# Altium footprint library RCW_PcbLib.PcbLib: 61 footprints (part 3 of 4)
Each footprint in its own frame and in the unit in brackets; x right, y up, seen from the top. Pads: shape width x height; smd on the part's side, far side on the other; paste and mask are expansions set on the pad; w line width, h text height; cw(c..) or ccw(c..) is an arc to the next point about the centre after c.
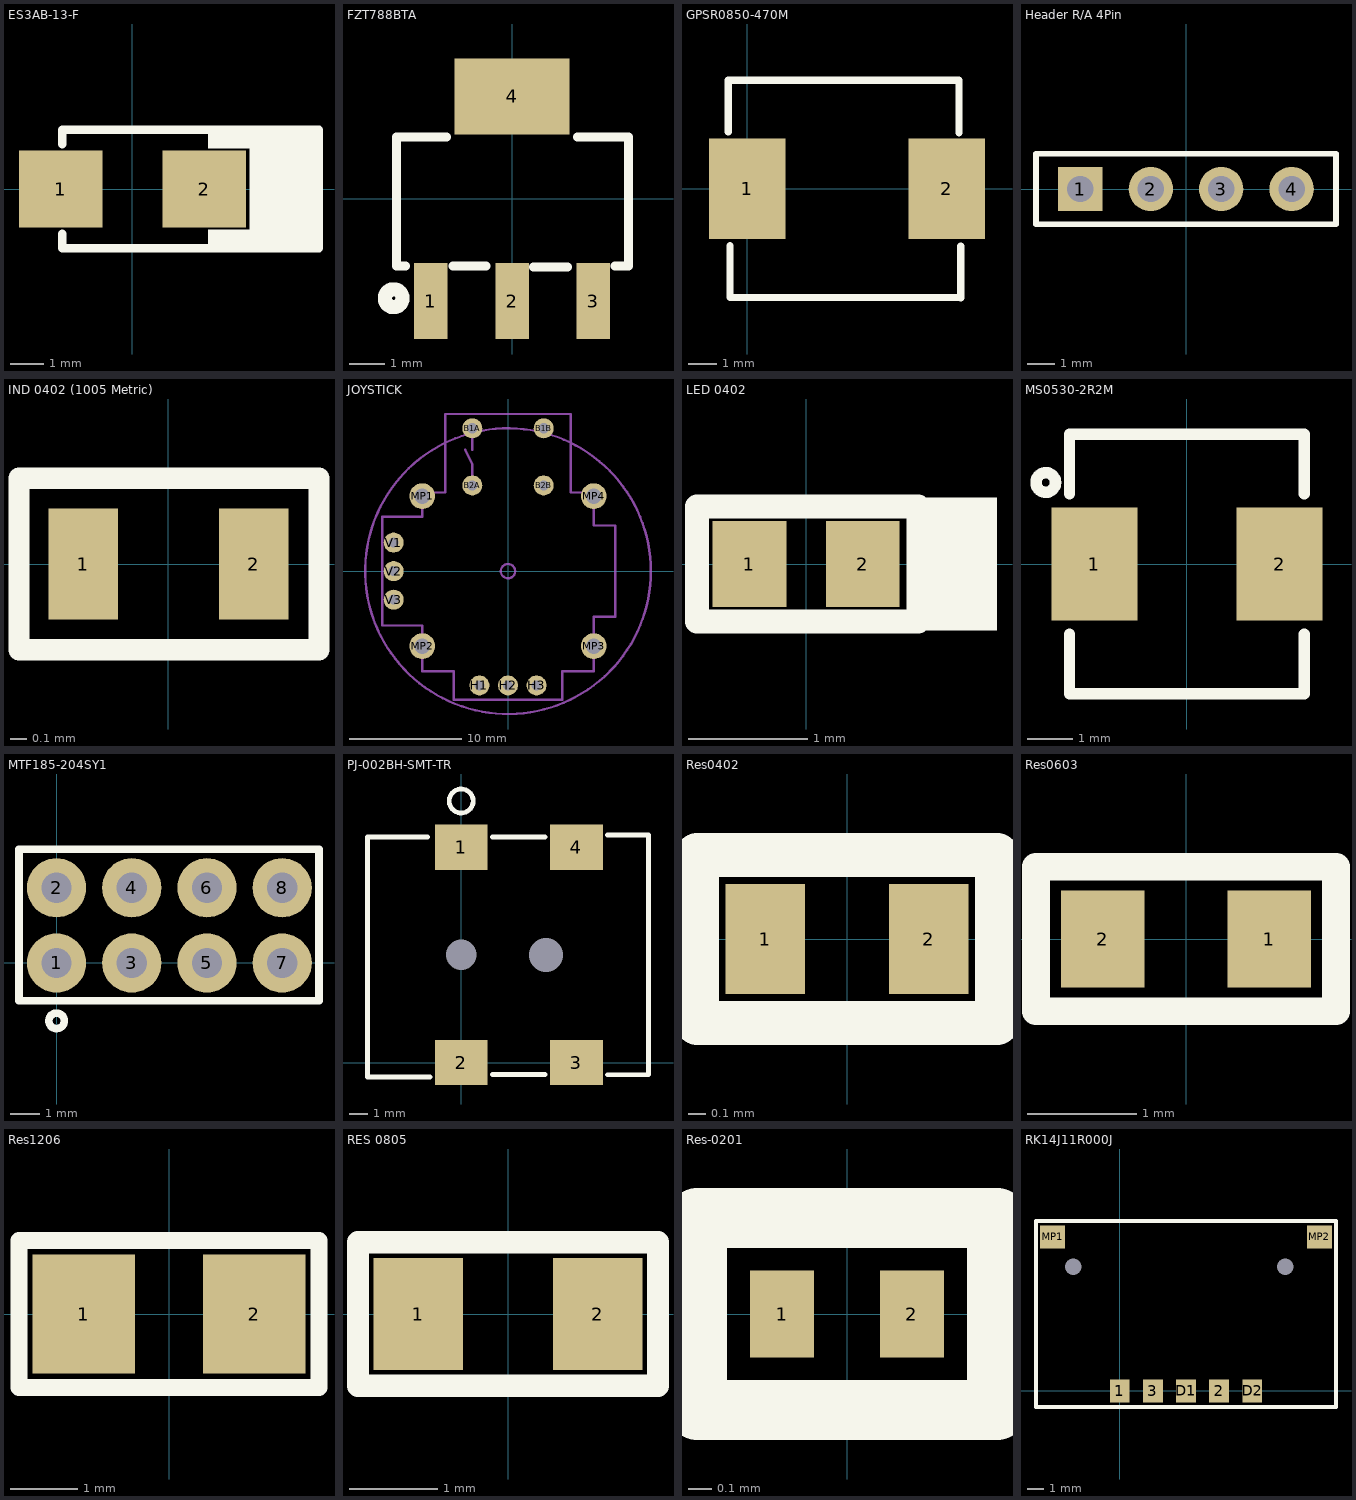
[diagram p2: the footprints below, top view; thin cyan lines are the x and y axes]

## ES3AB-13-F [mm] "DIODE GEN PURP 50V 3A SMB"
pads (2):
  rect 2.5x2.3 smd: 1(-2.15,0) 2(2.15,0)
Top Overlay:
  rectangle: 2.261,-1.778 3.607,-1.219
  rectangle: 2.261,1.219 3.607,1.778
  rectangle: 3.505,-1.778 5.588,1.778
  lines w0.254: -2.108,-1.346 -2.108,-1.778 5.588,-1.778 5.588,1.778 -2.108,1.778 -2.108,1.346
3D body "User Library-DO-214AA SMB.STEP": height 2.3, standoff 0, extent -2.7,-1.8 2.7,1.8

## FZT788BTA [mm]
pads (4):
  rect 0.95x2.15 smd: 1(-2.3,-2.9) 2(0,-2.9) 3(2.3,-2.9)
  rect 3.25x2.15 smd: 4(0,2.9)
Top Overlay:
  circle w0.4: c-3.353,-2.819 r0.251
  lines w0.254: -3.023,-1.905 -3.277,-1.905 -3.277,1.753 -1.854,1.753 ; -1.676,-1.905 -0.737,-1.905 ; 0.61,-1.93 1.575,-1.93 ; 1.854,1.753 3.302,1.753 3.302,-1.905 2.921,-1.905
3D body "CircuitWorks-SOT-223.STEP": height 1.65, standoff -0.03, extent -3.275,-3.505 3.225,3.455

## GPSR0850-470M [mm] "47uH ±20% 2A 206mO SMD"
pads (2):
  rect 2.65x3.5 smd: 1(0,0) 2(6.95,0)
Top Overlay:
  lines w0.254: -0.66,1.981 -0.66,3.785 7.38,3.785 ; -0.598,-1.981 -0.598,-3.784 -0.597,-3.785 7.442,-3.785 ; 7.38,1.943 7.38,3.746 ; 7.442,-3.797 7.442,-1.994

## Header R/A 4Pin [mm]
pads (4):
  rect 1.6x1.6 hole 0.95: 1(-3.81,0)
  round 1.6 hole 0.95: 2(-1.27,0) 3(1.27,0) 4(3.81,0)
Top Overlay:
  lines w0.2: -5.41,-1.27 -5.41,1.27 5.41,1.27 5.41,-1.27 -5.41,-1.27
3D body "User Library-zl262-4s_p2-54_l10-66_w2-54_h8-5.step": height 8.8, standoff -2.7, extent -5.33,-1.27 5.33,1.27

## IND 0402 (1005 Metric) [mm] "FIXED IND 20NH 350MA 600 MOHM"
pads (2):
  rect 0.41x0.66 smd: 1(-0.505,0) 2(0.505,0)
Top Overlay:
  lines w0.127: -0.886,-0.508 -0.886,0.508 0.892,0.508 0.892,-0.508 -0.886,-0.508
3D body "L-W15AN1N3D10D--3DModel-STEP-231308 (1).STEP": height 0.6, standoff 0, extent -0.5,-0.3 0.5,0.3

## JOYSTICK [mil]
pads (14):
  round 70 / inner round 60 / far side round 70 hole 35.43: B1A(-125,500) B1B(125,500) B2A(-125,300) B2B(125,300)
  round 70 / inner round 60 / far side round 70 hole 35: H1(-100,-400) H2(0,-400) H3(100,-400) V1(-400,100) V2(-400,0) V3(-400,-100)
  round 90 / inner round 60 / far side round 90 hole 55: MP1(-300,262.5) MP2(-300,-262.5) MP3(300,-262.5) MP4(300,262.5)
Mechanical 8:
  circle w8: c0,0 r500
  lines w8: -150,425 -125,375 -125,325 ; -125,425 -125,475
Mechanical 22:
  circle w8: c0,0 r25
  lines w8: -440,-190 -300,-190 -300,-350 -190,-350 -190,-450 190,-450 190,-350 300,-350 300,-160 375,-160 375,160 300,160 300,275 220,275 220,550 -220,550 -220,275 -300,275 -300,190 -440,190 -440,-190
3D body "9032.STEP": height 1190, standoff -175, extent -547,-525.75 503,561.75
3D body: height 10, standoff 0, extent -75,437 -75,437

## LED 0402 [mm]
pads (2):
  rect 0.62x0.72 smd: 1(-0.475,0) 2(0.475,0)
Top Overlay:
  rectangle: 0.94,-0.559 1.6,0.559
  lines w0.2: -0.914,-0.483 0.94,-0.483 0.94,0.483 -0.914,0.483 -0.914,-0.483
3D body "User Library-LED-0402.step": height 0.45, standoff 0, extent -0.505,-0.25 0.505,0.25

## MS0530-2R2M [mm]
pads (2):
  rect 1.895x2.5 smd: 1(-2.047,0) 2(2.048,0)
Top Overlay:
  circle w0.254: c-3.124,1.803 r0.217
  lines w0.254: -2.6,-1.559 -2.6,-2.875 2.6,-2.875 2.6,-1.559 ; -2.6,1.559 -2.6,2.875 2.6,2.875 2.6,1.559

## MTF185-204SY1 [mm] "Female Header Female Socket 0.100\"(2.54mm) 8 2 Through Hole"
pads (8):
  round 2 hole 1.02: 1(0,0) 2(0,2.54) 3(2.54,0) 4(2.54,2.54) 5(5.08,0) 6(5.08,2.54) 7(7.62,0) 8(7.62,2.54)
Top Overlay:
  circle w0.254: c0,-1.956 r0.262
  lines w0.254: -1.27,-1.27 8.865,-1.27 8.865,3.835 -1.27,3.835 -1.27,-1.27

## PJ-002BH-SMT-TR [mm] "CONN PWR JACK 2.5X5.5MM SOLDER"
pads (6):
  rect 2.8x2.4 smd: 1(0,11.4) 2(0,0) 3(6.1,0) 4(6.1,11.4)
  round 0 hole 1.6 unplated: 5(0,5.7)
  round 0 hole 1.8 unplated: 6(4.5,5.7)
Top Overlay:
  circle w0.254: c0,13.843 r0.635
  lines w0.254: -1.778,11.938 -4.953,11.938 -4.953,-0.762 -1.651,-0.762 ; 1.651,-0.635 4.445,-0.635 ; 1.651,11.938 4.445,11.938 ; 7.747,-0.65 9.906,-0.65 9.906,12.05 7.747,12.05
3D body "CUI_DEVICES_PJ-002BH-SMT-TR.step": height 11.2, standoff -1, extent -4.987,-0.635 9.813,11.965

## Res0402 [mil]
pads (2):
  rect 18x25 smd: 1(-18.5,0) 2(18.5,0)
Top Overlay:
  lines w10: -34,-19 -34,19 34,19 34,-19 -34,-19
3D body "User Library-RES_1005-0402.step": height 16.14, standoff 0, extent -22.63,-10.82 22.64,10.83

## Res0603 [mil]
pads (2):
  rect 30x35 smd: 1(30,0) 2(-30,0)
Top Overlay:
  lines w10: -54,-26 54,-26 54,26 -54,26 -54,-26
3D body "User Library-RESC1608X05N.step": height 17.76, standoff 0, extent -30.51,-16.73 30.52,16.74

## Res1206 [mil]
pads (2):
  rect 60x70 smd: 1(-50,0) 2(50,0)
Top Overlay:
  lines w10: -88,-43 -88,43 88,43 88,-43 -88,-43
3D body "User Library-1206 SMD Resistor.step": height 39.45, standoff 0, extent -62.99,-31.49 63,31.51

## RES 0805 [mil] "SMD 0805"
pads (2):
  rect 40x50 smd: 1(-40,0) 2(40,0)
Top Overlay:
  lines w10: -67,-32 -67,32 67,32 67,-32 -67,-32
3D body "User Library-CR2012-0805.STEP": height 23.62, standoff 0, extent -39.34,-24.75 39.4,24.46

## Res-0201 [mm]
pads (2):
  rect 0.27x0.37 smd: 1(-0.275,0) 2(0.275,0)
Top Overlay:
  lines w0.254: -0.635,-0.406 0.635,-0.406 0.635,0.406 -0.635,0.406 -0.635,-0.406
3D body "User Library-0201(0603M) Res.step": height 0.29, standoff -0.02, extent -0.305,-0.152 0.305,0.153

## RK14J11R000J [mm] "10K ±30% SMD Potentiometers & Variable Resistors RoHS"
pads (9):
  rect 1.2x1.4 smd: 1(0,0) 2(6,0) 3(2,0) D1(4,0) D2(8,0)
  rect 0x0 hole 1 square unplated: MH1(-2.8,7.5) MH2(10,7.5)
  rect 1.5x1.4 smd: MP1(-4.05,9.3) MP2(12.05,9.3)
Top Overlay:
  lines w0.254: -5.055,-0.965 -5.055,10.262 13.056,10.262 13.056,-0.965 -5.055,-0.965